# Altium schematic symbol library Template.SchLib: 1 symbol
Pins are listed as number, name and electrical type; pins without a type are passive.

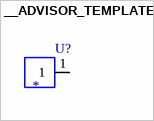
[diagram p0: symbol __ADVISOR_TEMPLATE__]

## __ADVISOR_TEMPLATE__
designator U?
template
pins: 1